# Altium footprint library CUI_CMT-1203-SMT.PcbLib: 1 footprints
Each footprint in its own frame and in the unit in brackets; x right, y up, seen from the top. Pads: shape width x height; smd on the part's side, far side on the other; paste and mask are expansions set on the pad; w line width, h text height; cw(c..) or ccw(c..) is an arc to the next point about the centre after c.
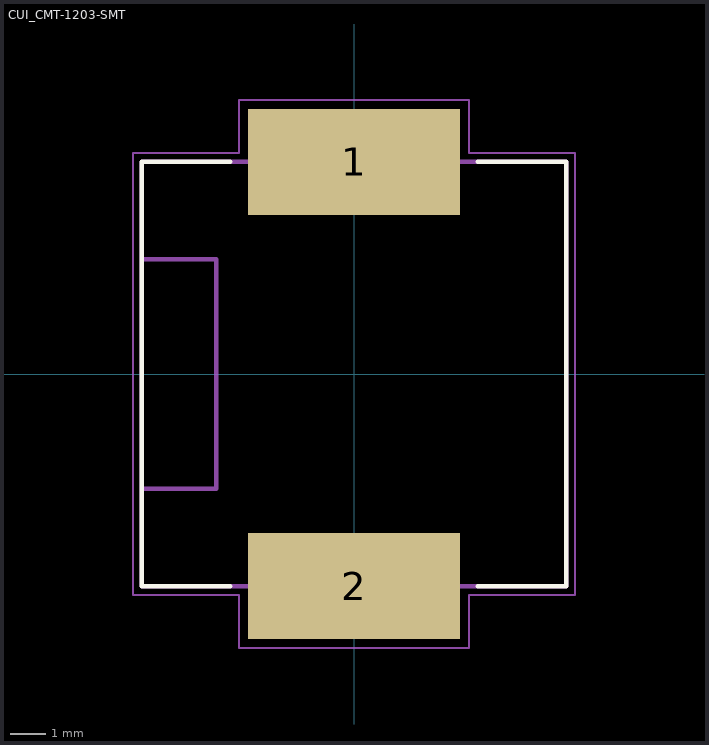
[diagram p0: the footprint, top view; thin cyan lines are the x and y axes]

## CUI_CMT-1203-SMT [mm]
pads (2):
  rect 6x3 smd: 1(0,6) 2(0,-6)
Top Overlay:
  lines w0.127: -3.5,-6 -6,-6 -6,6 -3.5,6 ; 3.5,-6 6,-6 6,6 3.5,6
Assembly Top:
  lines w0.127: -6,-3.25 -6,-6 6,-6 6,6 -6,6 -6,3.25 ; -6,-3.25 -6,3.25 ; -6,-3.25 -3.9,-3.25 -3.9,3.25 -6,3.25
Courtyard Top:
  lines w0.05: -6.25,-6.25 -6.25,6.25 -3.25,6.25 -3.25,7.75 3.25,7.75 3.25,6.25 6.25,6.25 6.25,-6.25 3.25,-6.25 3.25,-7.75 -3.25,-7.75 -3.25,-6.25 -6.25,-6.25
3D body "step_temp.STEP": height 3.05, standoff 0, extent -6,-6 6,6